# Altium footprint library Connector-USB.PcbLib: 42 footprints (part 2 of 3)
Each footprint in its own frame and in the unit in brackets; x right, y up, seen from the top. Pads: shape width x height; smd on the part's side, far side on the other; paste and mask are expansions set on the pad; w line width, h text height; cw(c..) or ccw(c..) is an arc to the next point about the centre after c.
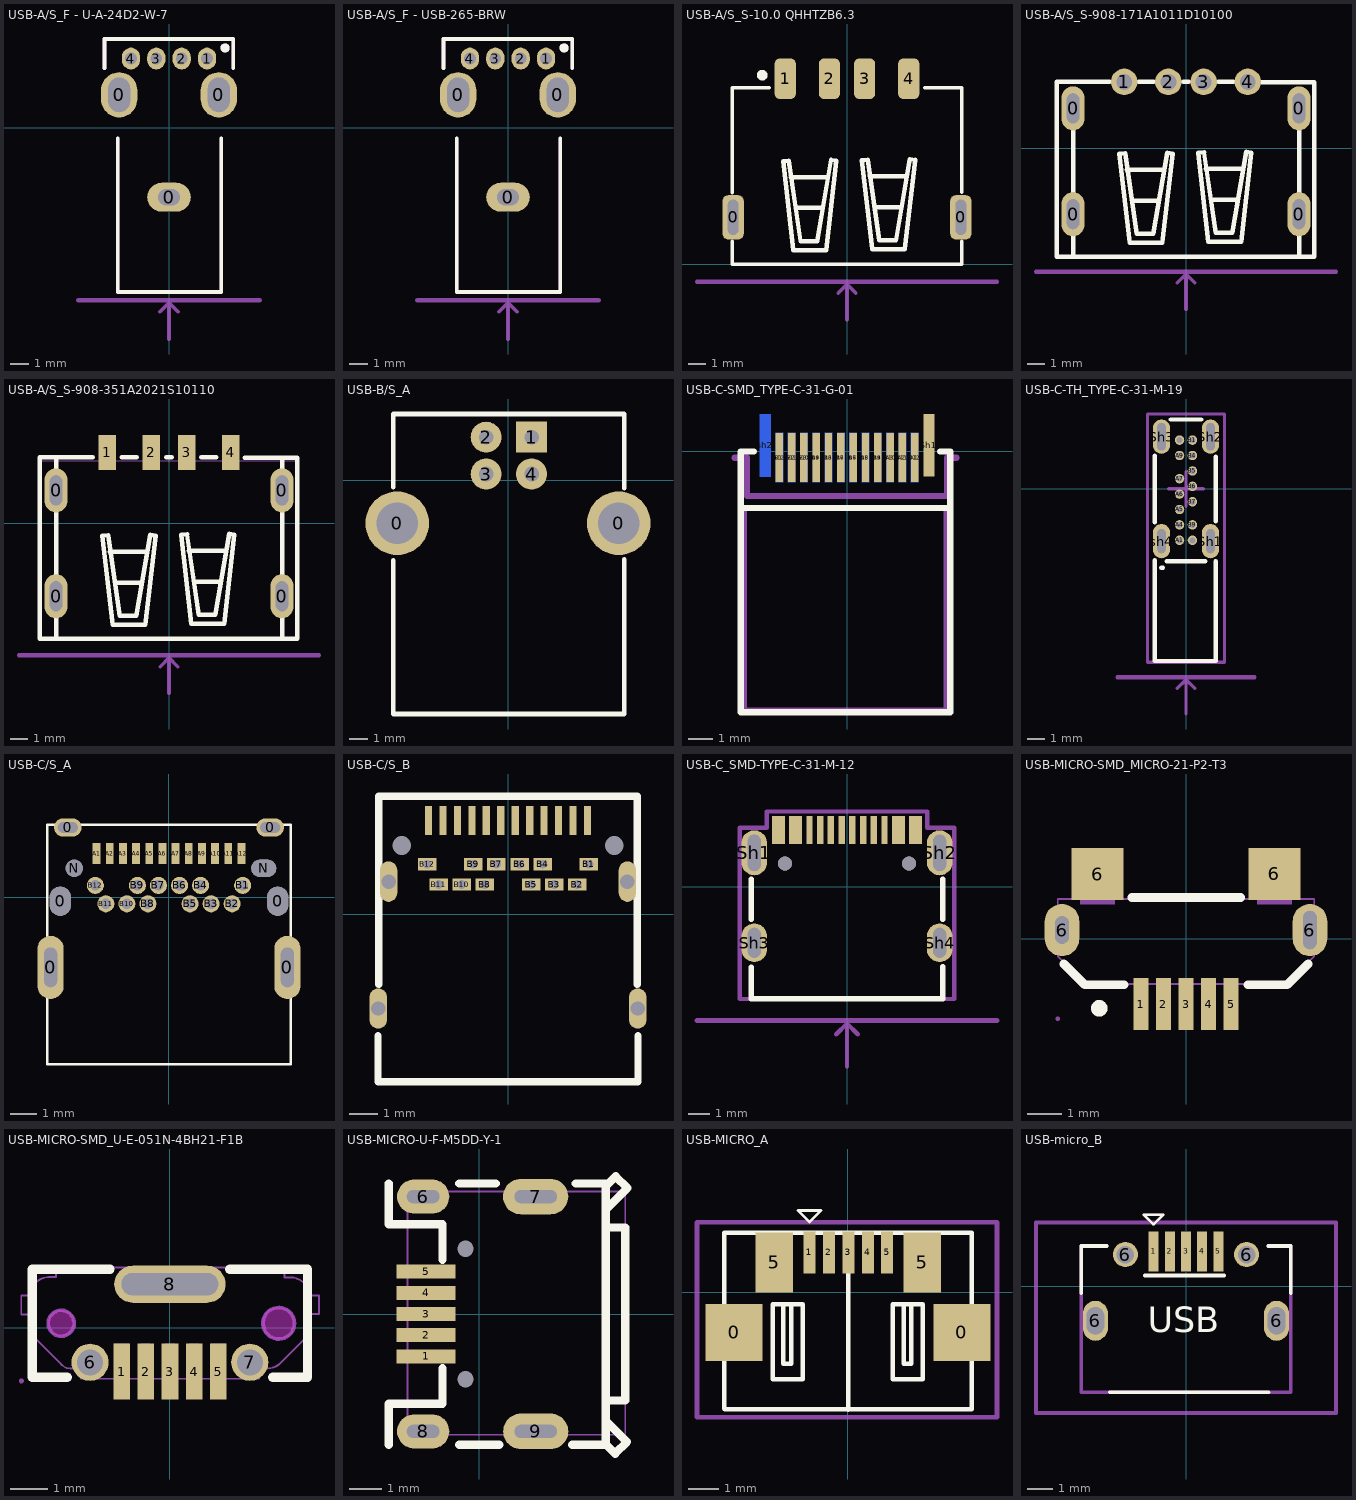
[diagram p1: the footprints below, top view; thin cyan lines are the x and y axes]

## USB-A/S_F - U-A-24D2-W-7 [mm] "U-A-24D2-W-7 & HRO 无卷边  白胶 USB-265-BRW()"
pads (7):
  oval 2x2.5 hole 1.2 slot 1.9 at 90 deg: 0(-2.75,1.825) 0(2.75,1.825)
  oval 2.4x1.6 hole 0.9 slot 1.2 at 0 deg: 0(0,-3.825)
  oval 1x1.2 hole 0.65: 1(2.1,3.825) 2(0.7,3.825) 3(-0.7,3.825) 4(-2.1,3.825)
Top Overlay:
  circle w0.25: c3.091,4.411 r0.125
  lines w0.2: -3.559,3.3 -3.559,4.903 3.552,4.903 3.552,3.3 ; -2.83,-0.579 -2.83,-9.049 2.89,-9.049 2.89,-0.579
Top Value:
  text "'.Comment'" at -0.436,3.24 h1.5
Top Designator:
  text "'.Designator'" at -0.314,4.296 h1.5
Body Extra:
  lines w0.2: -0.5,-10.144 0,-9.644 ; 0,-11.644 0,-9.644 ; 0.5,-10.144 0,-9.644
  lines w0.254: -5,-9.5 5,-9.5
Top Assembly (Mech20):
  circle w0.25: c3.091,4.411 r0.125
  lines w0.2: -3.559,3.3 -3.559,4.903 3.552,4.903 3.552,3.3 ; -2.83,-0.579 -2.83,-9.049 2.89,-9.049 2.89,-0.579
3D body "U-A-24D2-W-7(AF 14.0 CC-T).step": height 13.65, standoff -3.39, extent -3.559,-9.05 3.559,4.951

## USB-A/S_F - USB-265-BRW [mm] "USB-265-BRW 侧插 不带卷边 白色"
pads (7):
  oval 2x2.5 hole 1.2 slot 1.9 at 90 deg: 0(-2.75,1.825) 0(2.75,1.825)
  oval 2.4x1.6 hole 0.9 slot 1.2 at 0 deg: 0(0,-3.825)
  oval 1x1.2 hole 0.65: 1(2.1,3.825) 2(0.7,3.825) 3(-0.7,3.825) 4(-2.1,3.825)
Top Overlay:
  circle w0.25: c3.091,4.411 r0.125
  lines w0.2: -3.559,3.3 -3.559,4.903 3.552,4.903 3.552,3.3 ; -2.83,-0.579 -2.83,-9.049 2.89,-9.049 2.89,-0.579
Top Value:
  text "'.Comment'" at -0.436,3.24 h1.5
Top Designator:
  text "'.Designator'" at -0.314,4.296 h1.5
Body Extra:
  lines w0.2: -0.5,-10.144 0,-9.644 ; 0,-11.644 0,-9.644 ; 0.5,-10.144 0,-9.644
  lines w0.254: -5,-9.5 5,-9.5
Top Assembly (Mech20):
  circle w0.25: c3.091,4.411 r0.125
  lines w0.2: -3.559,3.3 -3.559,4.903 3.552,4.903 3.552,3.3 ; -2.83,-0.579 -2.83,-9.049 2.89,-9.049 2.89,-0.579
3D body "U-A-24D2-W-7(AF 14.0 CC-T).step": height 13.65, standoff -3.39, extent -3.559,-9.05 3.559,4.951

## USB-A/S_S-10.0 QHHTZB6.3 [mm] "SHOU HAN(首韩)  10.0 QHHTZB6.3"
pads (6):
  rrect50% 1.2x2.5 hole 0.6 slot 2 at 90 deg unplated: 0(-6.45,2.65) 0(6.45,2.65)
  rrect50% 1.2x2.3 smd: 1(-3.5,10.5) 2(-1,10.5) 3(1,10.5) 4(3.5,10.5)
Top Overlay:
  circle w0.3: c-4.8,10.7 r0.15
  lines w0.2: -6.5,1.302 -6.5,0 6.5,0 6.5,1.292 ; -6.5,4.03 -6.5,10 -4.4,10 ; 4.4,10 6.5,10 6.5,4.069
  lines w0.254: -3.193,4.932 -1.11,4.932 ; -2.863,3.179 -1.415,3.179 ; 1.278,4.982 3.36,4.982 ; 1.608,3.23 3.056,3.23 ; -3.622,5.838 -3.04,0.791 -1.186,0.791 -0.602,5.846 -0.907,5.897 -1.694,1.299 -2.634,1.299 -3.289,5.864 -3.622,5.838 ; 0.848,5.889 1.181,5.915 1.836,1.35 2.776,1.35 3.564,5.948 3.868,5.897 3.284,0.842 1.43,0.842 0.848,5.889
Top Component Outline:
  lines w0.2: -0.5,-1.644 0,-1.144 ; 0,-3.144 0,-1.144 ; 0.5,-1.644 0,-1.144
  lines w0.254: -8.5,-1 8.5,-1
Top Value:
  text "'.Comment'" at -3.08,6.124 h1.5
Top Designator:
  text "'.Designator'" at -4.136,6.245 h1.5
3D body "10.0 QHHTZB6.3.step": height 6.65, standoff -1.95, extent -7.25,0 7.25,11.4

## USB-A/S_S-908-171A1011D10100 [mm] "精拓金  908-171A1011D10100"
pads (8):
  oval 1.3x2.5 hole 0.7 slot 1.7 at 90 deg: 0(-6.4,-3.75) 0(-6.4,2.25) 0(6.4,-3.75) 0(6.4,2.25)
  round 1.5 hole 0.9: 1(-3.5,3.75) 2(-1,3.75) 3(1,3.75) 4(3.5,3.75)
Top Overlay:
  lines w0.2: -7.32,3.73 cw(c-7.3,3.73) -7.3,3.75
  lines w0.254: -7.32,-6.09 -7.32,-6.16 ; -7.32,3.73 -7.32,-6.16 ; -7.32,3.75 -4.331,3.75 ; -6.38,-4.981 -6.38,-6.16 -6.74,-6.16 ; -6.38,-2.519 -6.38,1.019 ; -3.353,-1.228 -1.27,-1.228 ; -3.023,-2.981 -1.575,-2.981 ; -2.669,3.75 -1.831,3.75 ; -0.169,3.75 0.169,3.75 ; 1.118,-1.177 3.2,-1.177 ; 1.448,-2.93 2.896,-2.93 ; 1.831,3.75 2.669,3.75 ; 4.29,3.73 7.26,3.73 7.26,-6.16 6.42,-6.16 ; 6.42,-4.981 6.42,-6.16 ; 6.42,-2.519 6.42,1.019 ; -7.32,-6.16 -6.74,-6.16 ; -6.74,-6.16 6.42,-6.16 ; -3.782,-0.322 -3.2,-5.368 -1.346,-5.368 -0.762,-0.314 -1.067,-0.263 -1.854,-4.86 -2.794,-4.86 -3.449,-0.296 -3.782,-0.322 ; 0.688,-0.271 1.021,-0.245 1.676,-4.81 2.616,-4.81 3.404,-0.212 3.708,-0.263 3.124,-5.318 1.27,-5.318 0.688,-0.271
Top Paste:
  drawing of 4 lines, arcs and shapes, not listed
Top Component Outline:
  lines w0.2: -0.5,-7.644 0,-7.144 ; 0,-9.144 0,-7.144 ; 0.5,-7.644 0,-7.144
  lines w0.254: -8.5,-7 8.5,-7
Top Value:
  text "'.Comment'" at -3.24,-0.036 h1.5
Top Designator:
  text "'.Designator'" at -4.296,0.085 h1.5
Top Assembly (Mech20):
  circle w0.6: c-3.5,3.75 r0.3
  circle w0.6: c1,3.75 r0.3
  circle w0.6: c3.5,3.75 r0.3
  circle w0.6: c-1,3.75 r0.3
  region: -6.55,-3.1 -6.25,-3.1 -6.25,-4.4 -6.55,-4.4
  region: -6.55,2.9 -6.25,2.9 -6.25,1.6 -6.55,1.6
  region: 6.25,2.9 6.55,2.9 6.55,1.6 6.25,1.6
  region: 6.25,-3.1 6.55,-3.1 6.55,-4.4 6.25,-4.4
  lines w0.051: -7.3,-6.08 7.3,-6.08 7.3,3.75 -7.3,3.75 -7.3,-6.08
3D body "USB-AS_S-908-171A1011D10100.step": height 6.9, standoff -2.8, extent -7.15,-6.08 7.15,3.92

## USB-A/S_S-908-351A2021S10110 [mm] "精拓金  908-351A2021S10110"
pads (8):
  oval 1.3x2.5 hole 0.7 slot 1.7 at 90 deg: 0(-6.4,-4.15) 0(-6.4,1.85) 0(6.4,-4.15) 0(6.4,1.85)
  rect 1x2 smd: 1(-3.5,4) 2(-1,4) 3(1,4) 4(3.5,4)
Top Overlay:
  lines w0.254: -6.38,-5.381 -6.38,-6.56 -6.74,-6.56 ; -6.38,-2.919 -6.38,0.619 ; -6.38,3.081 -6.38,3.72 ; -4.331,3.72 -7.32,3.72 -7.32,-6.49 -7.32,-6.56 -6.74,-6.56 ; -3.353,-1.628 -1.27,-1.628 ; -3.023,-3.381 -1.575,-3.381 ; -2.669,3.72 -1.831,3.72 ; -0.169,3.72 0.169,3.72 ; 1.118,-1.577 3.2,-1.577 ; 1.448,-3.33 2.896,-3.33 ; 1.831,3.72 2.669,3.72 ; 4.29,3.7 6.42,3.7 6.42,3.081 ; 6.292,3.7 7.26,3.7 7.26,-6.56 6.42,-6.56 ; 6.42,-5.381 6.42,-6.56 ; 6.42,-2.919 6.42,0.619 ; -6.74,-6.56 6.42,-6.56 ; -3.782,-0.721 -3.449,-0.696 -2.794,-5.26 -1.854,-5.26 -1.067,-0.663 -0.762,-0.714 -1.346,-5.768 -3.2,-5.768 -3.782,-0.721 ; 0.688,-0.671 1.27,-5.718 3.124,-5.718 3.708,-0.663 3.404,-0.612 2.616,-5.21 1.676,-5.21 1.021,-0.645 0.688,-0.671
Top Paste:
  drawing of 4 lines, arcs and shapes, not listed
Top Component Outline:
  lines w0.2: -0.5,-8.144 0,-7.644 ; 0,-9.644 0,-7.644 ; 0.5,-8.144 0,-7.644
  lines w0.254: -8.5,-7.5 8.5,-7.5
Top Value:
  text "'.Comment'" at -3.24,-0.436 h1.5
Top Designator:
  text "'.Designator'" at -4.296,-0.315 h1.5
Top Assembly (Mech20):
  region: -3.8,4.82 -3.2,4.82 -3.2,3.32 -3.8,3.32
  region: -1.3,4.82 -0.7,4.82 -0.7,3.32 -1.3,3.32
  region: 0.7,4.82 1.3,4.82 1.3,3.32 0.7,3.32
  region: 3.2,4.82 3.8,4.82 3.8,3.32 3.2,3.32
  region: 6.25,-3.5 6.55,-3.5 6.55,-4.8 6.25,-4.8
  region: 6.25,2.5 6.55,2.5 6.55,1.2 6.25,1.2
  region: -6.55,2.5 -6.25,2.5 -6.25,1.2 -6.55,1.2
  region: -6.55,-3.5 -6.25,-3.5 -6.25,-4.8 -6.55,-4.8
  lines w0.051: -7.3,-6.48 -7.3,3.52 7.3,3.52 7.3,-6.48 -7.3,-6.48
3D body "USB-AS_S-908-351A2021S10110_f.step": height 6.94, standoff -2.4, extent -7.2,-6.48 7.2,4.42

## USB-B/S_A [mm]
height 1.1
pads (6):
  round 3.5 hole 2.3: 0(-6.096,-2.371) 0(6.096,-2.371)
  rect 1.7x1.7 hole 0.8: 1(1.295,2.371)
  round 1.7 hole 0.8: 2(-1.205,2.371) 3(-1.205,0.339) 4(1.295,0.339)
Top Overlay:
  lines w0.254: -6.305,-4.398 -6.305,-12.869 6.395,-12.869 6.395,-4.347 ; -6.305,-0.385 -6.305,3.641 6.395,3.641 6.395,-0.436
Top Value:
  text "'.Comment'" at -4.314,-0.581 h2
Top Designator:
  text "'.Designator'" at -5.721,-0.419 h2
3D body "USB-B_S-A.STEP": height 11.45, standoff -2.95, extent -6.708,-12.891 7.01,3.409

## USB-C-SMD_TYPE-C-31-G-01 [mm]
pads (26):
  rect 0.3x2 smd: A1(2.75,-0.25) A2(2.25,-0.25) A3(1.75,-0.25) A4(1.25,-0.25) A5(0.75,-0.25) A6(0.25,-0.25) A7(-0.25,-0.25) A8(-0.75,-0.25) A9(-1.25,-0.25) A10(-1.75,-0.25) A11(-2.25,-0.25) A12(-2.75,-0.25)
  rect 0.3x2 smd far side: B1(-2.75,-0.25) B2(-2.25,-0.25) B3(-1.75,-0.25) B4(-1.25,-0.25) B5(-0.75,-0.25) B6(-0.25,-0.25) B7(0.25,-0.25) B8(0.75,-0.25) B9(1.25,-0.25) B10(1.75,-0.25) B11(2.25,-0.25) B12(2.75,-0.25)
  rect 0.45x2.54 smd: Sh1(3.325,0.25)
  rect 0.45x2.54 smd far side: sh2(-3.325,0.25)
Top Overlay:
  lines w0.254: -4.318,-2.3 0.02,-2.3 4.191,-2.3 ; -3.781,0 -4.318,0 -4.318,-10.6 4.191,-10.6 4.191,0 3.781,0
Top Component Outline:
  region: -4.318,-2.413 -4.318,-10.668 4.191,-10.668 4.191,-2.413 3.937,-2.413 3.937,-10.414 -4.064,-10.414 -4.064,-2.413
  lines w0.254: -4.572,-0.255 -4.065,-0.255 -4.065,-0.666 ; -4.065,-0.666 -4.065,-1.809 4.063,-1.809 4.063,-0.666 4.063,-0.255 4.445,-0.255
3D body "664121_1657865677_cdfdff936b258642.stp": height 1, standoff -2, extent -4.25,-10.553 4.15,1.053

## USB-C-TH_TYPE-C-31-M-19 [mm]
pads (18):
  round 0.55 hole 0.35: A1(-0.375,-3) A4(-0.375,-2.1) A5(-0.375,-1.2) A6(-0.375,-0.3) A7(-0.375,0.6) A9(-0.375,1.95) A12(-0.375,2.85) B1(0.375,2.85) B4(0.375,1.95) B5(0.375,1.05) B6(0.375,0.15) B7(0.375,-0.75) B9(0.375,-2.1) B12(0.375,-3)
  oval 1x2 hole 0.5 slot 1.4 at 90 deg: Sh1(1.43,-3.05) sh4(-1.43,-3.05)
  oval 1x2 hole 0.5 slot 1.6 at 90 deg: Sh2(1.43,3.05) Sh3(-1.43,3.05)
Top Overlay:
  lines w0.254: -1.83,-4.162 -1.83,-10.05 1.73,-10.05 1.73,-4.216 1.727,-4.216 ; -1.83,-1.938 -1.83,1.939 ; -1.449,-4.597 -1.346,-4.597 ; -1.133,-4.216 1.133,-4.216 ; -0.898,4.05 0.897,4.05 ; 1.73,-1.883 1.73,1.884
Top Component Outline:
  lines w0.2: -2.25,-10.125 -2.25,4.375 2.25,4.375 2.25,-10.125 -2.25,-10.125
Top Component Center:
  lines w0.2: -1,0 1,0 ; 0,-1 0,1
Top Value:
  text "'.Comment'" at -0.581,4.314 h2
Top Designator:
  text "'.Designator'" at -0.419,5.721 h2
Body Extra:
  lines w0.2: -0.5,-11.644 0,-11.144 ; 0,-13.144 0,-11.144 ; 0.5,-11.644 0,-11.144
  lines w0.254: -4,-11 4,-11
3D body "type-c-31-m-19_s201b25d.stp": height 9.35, standoff -1.52, extent -1.85,-10.05 1.85,3.95

## USB-C/S_A [mm]
pads (32):
  oval 1x2.4 hole 0.5 slot 1.5 at 90 deg: 0(-4.5,-2.657) 0(4.5,-2.657)
  oval 0.8x1.1 hole 0.8 slot 1.1 at 90 deg: 0(-4.13,-0.142) 0(4.13,-0.142)
  oval 1.05x0.7 hole 0.4 slot 0.75 at 0 deg: 0(-3.845,2.658) 0(3.845,2.658)
  rect 0.3x0.8 smd: A1(-2.75,1.667) A2(-2.25,1.667) A3(-1.75,1.667) A4(-1.25,1.667) A5(-0.75,1.667) A6(-0.25,1.667) A7(0.25,1.667) A8(0.75,1.667) A9(1.25,1.667) A10(1.75,1.667) A11(2.25,1.667) A12(2.75,1.667)
  round 0.65 hole 0.4: B1(2.8,0.457) B2(2.4,-0.242) B3(1.6,-0.242) B4(1.2,0.457) B5(0.8,-0.242) B6(0.4,0.457) B7(-0.4,0.457) B8(-0.8,-0.242) B9(-1.2,0.457) B10(-1.6,-0.242) B11(-2.4,-0.242) B12(-2.8,0.457)
  round 0.65 hole 0.65: N(-3.6,1.108)
  oval 0.95x0.65 hole 0.65 slot 0.95 at 0 deg: N(3.6,1.108)
Top Overlay:
  lines w0.1: -4.625,-6.342 -4.625,2.758 4.625,2.758 4.625,-6.342 -4.625,-6.342
Top Value:
  text "'.Comment'" at -4.314,-0.581 h2
Top Designator:
  text "'.Designator'" at -5.721,-0.419 h2

## USB-C/S_B [mm]
pads (30):
  rect 0.25x1 smd: A1(-2.75,3.253) A2(-2.25,3.253) A3(-1.75,3.253) A4(-1.25,3.253) A5(-0.75,3.253) A6(-0.25,3.253) A7(0.25,3.253) A8(0.75,3.253) A9(1.25,3.253) A10(1.75,3.253) A11(2.25,3.253) A12(2.75,3.253)
  rect 0.64x0.42 hole 0.3: B1(2.8,1.737) B2(2.4,1.037) B3(1.6,1.037) B4(1.2,1.737) B5(0.8,1.037) B6(0.4,1.737) B7(-0.4,1.737) B8(-0.8,1.037) B9(-1.2,1.737) B10(-1.6,1.037) B11(-2.4,1.037) B12(-2.8,1.737)
  oval 0.6x1.4 hole 0.5: ""(-4.49,-3.253) ""(-4.13,1.137) ""(4.13,1.137) ""(4.49,-3.253)
  round 0 hole 0.65: ""(-3.675,2.387) ""(3.675,2.387)
Top Overlay:
  lines w0.254: -4.5,-4.2 -4.5,-5.783 4.5,-5.783 4.5,-4.2 ; -4.475,-2.413 -4.475,4.087 4.475,4.087 4.475,-2.413
Top Value:
  text "'.Comment'" at -4.314,-0.581 h2
Top Designator:
  text "'.Designator'" at -5.721,-0.419 h2

## USB-C_SMD-TYPE-C-31-M-12 [mm]
pads (22):
  rect 0.3x1.3 smd: A1(-3.35,2.643) A4(-2.55,2.643) A5(-1.25,2.643) A6(-0.25,2.643) A7(0.25,2.643) A8(1.25,2.643) A9(2.55,2.643) A12(3.35,2.643) B1(3.05,2.643) B4(2.25,2.643) B5(1.75,2.643) B6(0.75,2.643) B7(-0.75,2.643) B8(-1.75,2.643) B9(-2.25,2.643) B12(-3.05,2.643)
  oval 1.2x2.1 hole 0.6 slot 1.7 at 90 deg: Sh1(-4.325,1.575) Sh2(4.325,1.575)
  oval 1.2x1.8 hole 0.6 slot 1.4 at 90 deg: Sh3(-4.325,-2.625) Sh4(4.325,-2.625)
  round 0.65 hole 0.65 unplated: ""(-2.9,1.075) ""(2.9,1.075)
Top Overlay:
  lines w0.254: -4.469,-3.753 -4.469,-5.234 4.471,-5.234 4.471,-3.752 ; -4.469,-1.516 -4.469,0.347 ; 4.471,-1.516 4.471,0.348
Top Value:
  text "'.Comment'" at -4.314,-0.581 h2
Top Designator:
  text "'.Designator'" at -5.721,-0.419 h2
Body Extra:
  lines w0.2: -0.5,-6.894 0,-6.394 ; 0,-8.394 0,-6.394 ; 0.5,-6.894 0,-6.394
  lines w0.254: -7,-6.25 7,-6.25
Top Assembly (Mech20):
  lines w0.2: -5,-5.25 -5,2.75 -3.75,2.75 -3.75,3.5 3.75,3.5 3.75,2.75 5,2.75 5,-5.25 -5,-5.25
3D body "TYPE-C-31-M-12.stp": height 3.21, standoff -1.05, extent -4.47,-5.23 4.47,2.52

## USB-MICRO-SMD_MICRO-21-P2-T3 [mm]
pads (9):
  rect 0.429x1.509 smd mask+0.05: 1(-1.3,-1.877) 2(-0.65,-1.877) 3(0,-1.877) 4(0.65,-1.877) 5(1.3,-1.877)
  oval 1.001x1.501 hole 0.4 slot 0.8 at 90 deg mask+0.05: 6(-3.575,0.257)
  rect 1.501x1.501 smd mask+0.05: 6(-2.55,1.872) 6(2.55,1.877)
  oval 1.001x1.501 hole 0.4 slot 1.1 at 90 deg mask+0.05: 6(3.575,0.257)
Top Overlay:
  circle w0.239: c-2.5,-2 r0.119
  lines w0.254: -3.523,-0.719 -2.921,-1.321 -1.781,-1.321 ; -1.56,1.196 1.577,1.196 ; 1.781,-1.321 2.921,-1.321 3.523,-0.719
Top Paste:
  region: 1.801,2.626 3.299,2.626 3.299,1.128 1.801,1.128
  region: -3.299,2.621 -1.801,2.621 -1.801,1.123 -3.299,1.123
  region: 1.049,-1.123 1.549,-1.123 1.549,-2.631 1.049,-2.631
  region: 0.401,-1.123 0.899,-1.123 0.899,-2.631 0.401,-2.631
  region: -0.249,-1.123 0.249,-1.123 0.249,-2.631 -0.249,-2.631
  region: -0.899,-1.123 -0.399,-1.123 -0.399,-2.631 -0.899,-2.631
  region: -1.549,-1.123 -1.049,-1.123 -1.049,-2.631 -1.549,-2.631
  region: 3.099,0.508 3.1,0.607 3.176,0.79 3.317,0.929 3.5,1.005 3.698,1.005 3.881,0.929 4.022,0.79 4.099,0.607 4.1,0.508 4.1,0.008 4.099,-0.091 4.022,-0.274 3.881,-0.414 3.698,-0.489 3.5,-0.489 3.317,-0.414 3.176,-0.274 3.1,-0.091 3.099,0.008
  region: -4.1,0.508 -4.099,0.607 -4.022,0.79 -3.881,0.929 -3.698,1.005 -3.5,1.005 -3.317,0.929 -3.176,0.79 -3.1,0.607 -3.099,0.508 -3.099,0.008 -3.1,-0.091 -3.176,-0.274 -3.317,-0.414 -3.5,-0.489 -3.698,-0.489 -3.881,-0.414 -4.022,-0.274 -4.099,-0.091 -4.1,0.008
Top Component Outline:
  region: -3.051,1.001 -3.051,2.2 -2.05,2.2 -2.05,1.001
  region: 2.05,1.001 2.05,2.2 3.051,2.2 3.051,1.001
  region: -1.425,-1.25 -1.176,-1.25 -1.176,-2.299 -1.425,-2.299
  region: -0.775,-1.25 -0.526,-1.25 -0.526,-2.299 -0.775,-2.299
  region: -0.124,-1.25 0.124,-1.25 0.124,-2.299 -0.124,-2.299
  region: 0.526,-1.25 0.775,-1.25 0.775,-2.299 0.526,-2.299
  region: 1.176,-1.25 1.425,-1.25 1.425,-2.299 1.176,-2.299
  region: -3.701,0.632 -3.449,0.632 -3.449,-0.117 -3.701,-0.117
  region: 3.449,0.632 3.701,0.632 3.701,-0.117 3.449,-0.117
  region: -3.64,-2.299 -3.64,-2.273 -3.676,-2.238 -3.726,-2.238 -3.762,-2.273 -3.762,-2.299 -3.762,-2.324 -3.726,-2.36 -3.676,-2.36 -3.64,-2.324 -3.64,-2.299
  lines w0.051: -3.701,-0.5 -2.85,-1.3 2.85,-1.3 3.701,-0.5 3.701,1.151 -3.701,1.151 -3.701,-0.5
Top Value:
  text "'.Comment'" at -4.314,-0.581 h2
Top Designator:
  text "'.Designator'" at -5.721,-0.419 h2
Top Assembly:
  region: -3.051,1.001 -3.051,2.2 -2.05,2.2 -2.05,1.001
  region: 2.05,1.001 2.05,2.2 3.051,2.2 3.051,1.001
  region: -1.425,-1.25 -1.176,-1.25 -1.176,-2.299 -1.425,-2.299
  region: -0.775,-1.25 -0.526,-1.25 -0.526,-2.299 -0.775,-2.299
  region: -0.124,-1.25 0.124,-1.25 0.124,-2.299 -0.124,-2.299
  region: 0.526,-1.25 0.775,-1.25 0.775,-2.299 0.526,-2.299
  region: 1.176,-1.25 1.425,-1.25 1.425,-2.299 1.176,-2.299
  region: -3.701,0.632 -3.449,0.632 -3.449,-0.117 -3.701,-0.117
  region: 3.449,0.632 3.701,0.632 3.701,-0.117 3.449,-0.117
  region: -3.64,-2.299 -3.64,-2.273 -3.676,-2.238 -3.726,-2.238 -3.762,-2.273 -3.762,-2.299 -3.762,-2.324 -3.726,-2.36 -3.676,-2.36 -3.64,-2.324 -3.64,-2.299
  lines w0.051: -3.701,-0.5 -2.85,-1.3 2.85,-1.3 3.701,-0.5 3.701,1.151 -3.701,1.151 -3.701,-0.5
Top Assembly (Mech20):
  region: -3.051,1.001 -3.051,2.2 -2.05,2.2 -2.05,1.001
  region: 2.05,1.001 2.05,2.2 3.051,2.2 3.051,1.001
  region: -1.425,-1.25 -1.176,-1.25 -1.176,-2.299 -1.425,-2.299
  region: -0.775,-1.25 -0.526,-1.25 -0.526,-2.299 -0.775,-2.299
  region: -0.124,-1.25 0.124,-1.25 0.124,-2.299 -0.124,-2.299
  region: 0.526,-1.25 0.775,-1.25 0.775,-2.299 0.526,-2.299
  region: 1.176,-1.25 1.425,-1.25 1.425,-2.299 1.176,-2.299
  region: -3.701,0.632 -3.449,0.632 -3.449,-0.117 -3.701,-0.117
  region: 3.449,0.632 3.701,0.632 3.701,-0.117 3.449,-0.117
  region: -3.64,-2.299 -3.64,-2.273 -3.676,-2.238 -3.726,-2.238 -3.762,-2.273 -3.762,-2.299 -3.762,-2.324 -3.726,-2.36 -3.676,-2.36 -3.64,-2.324 -3.64,-2.299
  lines w0.051: -3.701,-0.5 -2.85,-1.3 2.85,-1.3 3.701,-0.5 3.701,1.151 -3.701,1.151 -3.701,-0.5

## USB-MICRO-SMD_U-E-051N-4BH21-F1B [mm] "MicroUSB 母座立贴"
pads (8):
  rect 0.45x1.501 smd mask+0.051: 1(-1.3,-1.176) 2(-0.65,-1.176) 3(0,-1.176) 4(0.65,-1.176) 5(1.3,-1.176)
  round 1.001 hole 0.701 mask+0.051: 6(-2.149,-0.925) 7(2.149,-0.925)
  oval 3x1.001 hole 0.599 slot 2.601 at 0 deg mask+0.051: 8(0,1.176)
Top Overlay:
  lines w0.254: -2.761,-1.326 -3.701,-1.326 -3.701,1.575 -1.613,1.575 ; 1.61,1.575 3.701,1.575 3.701,-1.326 2.761,-1.326
Top Paste:
  circle w0.5: c-2.149,-0.925 r0.249
  circle w0.5: c2.149,-0.925 r0.249
  region: -1.031,1.679 -1.123,1.679 -1.292,1.609 -1.421,1.48 -1.491,1.311 -1.491,1.219 -1.491,1.191 -1.491,1.14 -1.491,1.047 -1.419,0.874 -1.287,0.742 -1.115,0.671 -1.021,0.671 1.021,0.671 1.023,0.671 1.027,0.672 1.03,0.675 1.031,0.679 1.031,0.681 1.125,0.681 1.297,0.752 1.43,0.884 1.501,1.057 1.501,1.151 1.501,1.199 1.501,1.229 1.501,1.319 1.432,1.485 1.305,1.611 1.139,1.679 1.049,1.679
  region: -1.074,-1.923 -1.524,-1.923 -1.524,-0.424 -1.074,-0.424
  region: -0.424,-1.923 -0.874,-1.923 -0.874,-0.424 -0.424,-0.424
  region: 0.226,-1.923 -0.226,-1.923 -0.226,-0.424 0.226,-0.424
  region: 0.874,-1.923 0.424,-1.923 0.424,-0.424 0.874,-0.424
  region: 1.524,-1.923 1.074,-1.923 1.074,-0.424 1.524,-0.424
Keep-Out Layer:
  board cut-out: 3.35,0.124 3.35,0.209 3.286,0.365 3.166,0.484 3.01,0.549 2.842,0.549 2.686,0.484 2.566,0.365 2.502,0.209 2.502,0.124 2.502,0.04 2.566,-0.116 2.686,-0.235 2.842,-0.3 3.01,-0.3 3.166,-0.235 3.286,-0.116 3.35,0.04 3.35,0.124
  board cut-out: -2.576,0.124 -2.576,0.194 -2.629,0.323 -2.728,0.422 -2.856,0.475 -2.996,0.475 -3.125,0.422 -3.223,0.323 -3.277,0.194 -3.277,0.124 -3.277,0.055 -3.223,-0.074 -3.125,-0.173 -2.996,-0.226 -2.856,-0.226 -2.728,-0.173 -2.629,-0.074 -2.576,0.055 -2.576,0.124
  board cut-out: 2.502,0.124 2.502,0.04 2.566,-0.116 2.686,-0.235 2.842,-0.3 2.926,-0.3 3.01,-0.3 3.166,-0.235 3.286,-0.116 3.35,0.04 3.35,0.124 3.35,0.209 3.286,0.365 3.166,0.484 3.01,0.549 2.926,0.549 2.842,0.549 2.686,0.484 2.566,0.365 2.502,0.209
  board cut-out: -2.926,-0.226 -2.996,-0.226 -3.125,-0.173 -3.223,-0.074 -3.277,0.055 -3.277,0.124 -3.277,0.194 -3.223,0.323 -3.125,0.422 -2.996,0.475 -2.926,0.475 -2.856,0.475 -2.728,0.422 -2.629,0.323 -2.576,0.194 -2.576,0.124 -2.576,0.055 -2.629,-0.074 -2.728,-0.173 -2.856,-0.226
Board Outline:
  circle w0.1: c2.926,0.124 r0.424
  circle w0.1: c-2.926,0.124 r0.351
Top Component Outline:
  region: -1.1,-0.424 -1.1,-1.425 -1.501,-1.425 -1.501,-0.424
  region: 1.501,-0.424 1.501,-1.425 1.1,-1.425 1.1,-0.424
  region: -0.526,-0.424 -0.526,-1.425 -0.775,-1.425 -0.775,-0.424
  region: 0.124,-0.424 0.124,-1.425 -0.124,-1.425 -0.124,-0.424
  region: 0.775,-0.424 0.775,-1.425 0.526,-1.425 0.526,-0.424
  region: 1.001,0.935 -1.001,0.935 -1.001,1.415 1.001,1.415
  region: 2.398,-0.925 2.398,-0.875 2.36,-0.784 2.29,-0.714 2.198,-0.676 2.099,-0.676 2.008,-0.714 1.938,-0.784 1.9,-0.875 1.9,-0.925 1.9,-0.974 1.938,-1.066 2.008,-1.136 2.099,-1.173 2.198,-1.173 2.29,-1.136 2.36,-1.066 2.398,-0.974 2.398,-0.925
  region: -1.9,-0.925 -1.9,-0.875 -1.938,-0.784 -2.008,-0.714 -2.099,-0.676 -2.198,-0.676 -2.29,-0.714 -2.36,-0.784 -2.398,-0.875 -2.398,-0.925 -2.398,-0.974 -2.36,-1.066 -2.29,-1.136 -2.198,-1.173 -2.099,-1.173 -2.008,-1.136 -1.938,-1.066 -1.9,-0.974 -1.9,-0.925
  region: -3.94,-1.425 -3.94,-1.4 -3.975,-1.364 -4.026,-1.364 -4.061,-1.4 -4.061,-1.425 -4.061,-1.45 -4.026,-1.486 -3.975,-1.486 -3.94,-1.45 -3.94,-1.425
  lines w0.051: -4,0.361 -3.749,0.361 cw(c-3.775,0.336) -3.739,0.335 -3.739,0.01 -3.739,-0.028 ccw(c-3.398,-0.029) -3.64,-0.269 -2.916,-0.993 ccw(c-2.899,-0.979) -2.901,-1.001 ccw(c-2.684,-0.782) -2.682,-1.09 -2.601,-1.09 -2.413,-1.09 cw(c-2.414,-1.122) -2.39,-1.1 -2.39,-1.369 -1.519,-1.369 2.4,-1.369 2.4,-1.09 2.629,-1.09 ccw(c2.629,-0.605) 2.972,-0.947 3,-0.919 3.655,-0.264 ccw(c3.623,-0.229) 3.67,-0.231 ccw(c3.499,-0.063) 3.739,-0.061 3.739,0.17 3.739,0.345 cw(c3.775,0.346) 3.749,0.371 4.011,0.371 4.011,0.871 3.739,0.871 ccw(c3.251,0.871) 3.251,1.359 3.081,1.359 3.081,1.641 cw(c3.071,1.641) 3.071,1.631 -3.071,1.631 -3.071,1.369 -3.251,1.369 ccw(c-3.251,0.871) -3.749,0.871 -4,0.871 -4,0.361
Top Value:
  text "'.Comment'" at -4.314,-0.581 h2
Top Designator:
  text "'.Designator'" at -5.721,-0.419 h2
Top Assembly (Mech20):
  region: -1.1,-0.424 -1.1,-1.425 -1.501,-1.425 -1.501,-0.424
  region: 1.501,-0.424 1.501,-1.425 1.1,-1.425 1.1,-0.424
  region: -0.526,-0.424 -0.526,-1.425 -0.775,-1.425 -0.775,-0.424
  region: 0.124,-0.424 0.124,-1.425 -0.124,-1.425 -0.124,-0.424
  region: 0.775,-0.424 0.775,-1.425 0.526,-1.425 0.526,-0.424
  region: 1.001,0.935 -1.001,0.935 -1.001,1.415 1.001,1.415
  region: 2.398,-0.925 2.398,-0.875 2.36,-0.784 2.29,-0.714 2.198,-0.676 2.099,-0.676 2.008,-0.714 1.938,-0.784 1.9,-0.875 1.9,-0.925 1.9,-0.974 1.938,-1.066 2.008,-1.136 2.099,-1.173 2.198,-1.173 2.29,-1.136 2.36,-1.066 2.398,-0.974 2.398,-0.925
  region: -1.9,-0.925 -1.9,-0.875 -1.938,-0.784 -2.008,-0.714 -2.099,-0.676 -2.198,-0.676 -2.29,-0.714 -2.36,-0.784 -2.398,-0.875 -2.398,-0.925 -2.398,-0.974 -2.36,-1.066 -2.29,-1.136 -2.198,-1.173 -2.099,-1.173 -2.008,-1.136 -1.938,-1.066 -1.9,-0.974 -1.9,-0.925
  region: -3.94,-1.425 -3.94,-1.4 -3.975,-1.364 -4.026,-1.364 -4.061,-1.4 -4.061,-1.425 -4.061,-1.45 -4.026,-1.486 -3.975,-1.486 -3.94,-1.45 -3.94,-1.425
  lines w0.051: -4,0.361 -3.749,0.361 cw(c-3.775,0.336) -3.739,0.335 -3.739,0.01 -3.739,-0.028 ccw(c-3.398,-0.029) -3.64,-0.269 -2.916,-0.993 ccw(c-2.899,-0.979) -2.901,-1.001 ccw(c-2.684,-0.782) -2.682,-1.09 -2.601,-1.09 -2.413,-1.09 cw(c-2.414,-1.122) -2.39,-1.1 -2.39,-1.369 -1.519,-1.369 2.4,-1.369 2.4,-1.09 2.629,-1.09 ccw(c2.629,-0.605) 2.972,-0.947 3,-0.919 3.655,-0.264 ccw(c3.623,-0.229) 3.67,-0.231 ccw(c3.499,-0.063) 3.739,-0.061 3.739,0.17 3.739,0.345 cw(c3.775,0.346) 3.749,0.371 4.011,0.371 4.011,0.871 3.739,0.871 ccw(c3.251,0.871) 3.251,1.359 3.081,1.359 3.081,1.641 cw(c3.071,1.641) 3.071,1.631 -3.071,1.631 -3.071,1.369 -3.251,1.369 ccw(c-3.251,0.871) -3.749,0.871 -4,0.871 -4,0.361
3D body "U-E-051N-4BH21-S1B.stp": height 5.82, standoff -0.83, extent -3.902,-1.56 3.903,1.554

## USB-MICRO-U-F-M5DD-Y-1 [mm] "U-F-M5DD-Y-1 & HRO"
pads (11):
  round 0.1 hole 0.5 unplated: 0(-0.425,-2) 0(-0.425,2)
  rect 1.8x0.43 smd paste-100 mask+0.051: 1(-1.636,-1.3) 2(-1.636,-0.65) 3(-1.636,0) 4(-1.636,0.65) 5(-1.636,1.3)
  oval 1.6x1.05 hole 0.4 slot 1 at 0 deg paste-2539.97 mask+0.051: 6(-1.725,3.599) 8(-1.725,-3.599)
  oval 2x1.09 hole 0.4 slot 1.3 at 0 deg copper offset -0.001,0 paste-2539.97 mask+0.051: 7(1.725,3.599)
  oval 2x1.09 hole 0.4 slot 1.3 at 0 deg copper offset 0.001,0 paste-2539.97 mask+0.051: 9(1.725,-3.598)
Top Overlay:
  lines w0.254: -2.785,-4.01 -2.785,-2.76 ; -2.785,-2.75 -1.135,-2.75 -1.135,-1.66 ; -2.785,4 -2.785,2.75 -1.135,2.75 -1.135,1.66 ; -0.623,-4.01 0.603,-4.01 ; -0.617,4 0.497,4 ; 2.847,-4.01 3.875,-4.01 ; 2.953,4 3.875,4 3.875,-4 ; 3.85,-3.97 4.16,-4.28 4.52,-3.92 3.88,-3.28 ; 3.865,3.91 4.175,4.22 4.535,3.86 3.895,3.22 ; 3.88,-2.65 4.47,-2.65 4.47,2.65 3.88,2.65
Top Paste:
  drawing of 9 lines, arcs and shapes, not listed
Top Value:
  text "'.Comment'" at -0.591,4.314 h2
Top Designator:
  text "'.Designator'" at -0.429,5.721 h2
Top Assembly (Mech20):
  circle w0.2: c-0.425,-2 r0.1
  circle w0.2: c-0.425,2 r0.1
  region: -2.144,-3.699 -2.144,-3.674 -2.179,-3.639 -2.229,-3.639 -2.264,-3.674 -2.264,-3.699 -2.264,-3.724 -2.229,-3.759 -2.179,-3.759 -2.144,-3.724 -2.144,-3.699
  region: -1.908,-1.151 -1.008,-1.151 -1.008,-1.451 -1.908,-1.451
  region: -1.908,-0.5 -1.008,-0.5 -1.008,-0.8 -1.908,-0.8
  region: -1.908,0.15 -1.008,0.15 -1.008,-0.15 -1.908,-0.15
  region: -1.908,0.8 -1.008,0.8 -1.008,0.5 -1.908,0.5
  region: -1.908,1.45 -1.008,1.45 -1.008,1.15 -1.908,1.15
  region: -1.345,3.724 -1.345,3.474 -2.145,3.474 -2.145,3.724
  region: 2.18,3.724 2.18,3.474 1.27,3.474 1.27,3.724
  region: -1.345,-3.429 -1.345,-3.679 -2.145,-3.679 -2.145,-3.429
  region: 2.18,-3.429 2.18,-3.679 1.27,-3.679 1.27,-3.429
  lines w0.051: -2.204,-3.699 4.475,-3.699 4.475,3.755 -2.204,3.755 -2.204,-3.699
3D body "u-f-m5dd-y-1 v1.step": height 2.79, standoff -0.95, extent -2.23,-3.985 4.47,3.985

## USB-MICRO_A [mm]
pads (9):
  rect 1.9x1.9 smd: 0(-3.797,-1.333) 0(3.797,-1.333)
  rect 0.4x1.4 smd: 1(-1.283,1.333) 2(-0.635,1.333) 3(0.013,1.333) 4(0.66,1.333) 5(1.308,1.333)
  rect 1.25x2 smd: 5(-2.451,1.003) 5(2.476,1.003)
Top Overlay:
  lines w0.1: -1.664,2.73 -1.283,2.349 -0.902,2.73 -1.664,2.73
  lines w0.152: -4.127,-3.873 -4.127,1.994 ; -4.102,-3.899 4.102,-3.899 ; -4.077,1.994 4.102,1.994 ; -2.152,-0.394 -2.152,-2.379 -1.949,-2.379 -1.898,-2.379 -1.898,-0.394 ; 0.013,-3.91 0.013,1.968 ; 1.861,-0.394 1.861,-2.379 2.115,-2.379 2.115,-0.394 ; 4.127,-3.899 4.127,1.994 ; -2.513,-2.894 -2.513,-0.394 -1.513,-0.394 -1.513,-2.894 -2.513,-2.894 ; 1.487,-2.894 2.487,-2.894 2.487,-0.394 1.487,-0.394 1.487,-2.894
Top Value:
  text "'.Comment'" at -4.314,-0.581 h2
Top Designator:
  text "'.Designator'" at -5.721,-0.419 h2
Top Courtyard:
  lines w0.152: -5.033,-4.166 -5.033,2.334 4.967,2.334 4.967,-4.166 -5.033,-4.166
3D body "USB-MICRO_A.STEP": height 2.69, standoff -0.24, extent -3.994,-3.746 3.969,1.675

## USB-micro_B [mm]
pads (9):
  rect 0.4x1.6 smd paste-100 mask+0.051: 1(-1.3,1.387) 2(-0.65,1.387) 3(0,1.387) 4(0.65,1.387) 5(1.3,1.387)
  oval 1x1.6 hole 0.7 slot 1.1 at 90 deg paste-2539.97 mask+0.051: 6(-3.625,-1.387) 6(3.625,-1.387)
  round 1 hole 0.7 paste-2539.97 mask+0.051: 6(-2.425,1.263) 6(2.425,1.263)
Top Overlay:
  lines w0.1: -1.681,2.847 -0.919,2.847 -1.3,2.466 -1.681,2.847
  lines w0.152: -4.191,-0.282 -4.191,1.598 -3.175,1.598 ; -3.048,-4.244 3.302,-4.244 ; -1.65,0.425 1.525,0.425 ; 3.302,1.598 4.191,1.598 4.191,-0.282
  text "USB" at -1.524,-1.852 h1.02
Top Value:
  text "'.Comment'" at -4.314,-0.581 h2
Top Designator:
  text "'.Designator'" at -5.721,-0.419 h2
Top Courtyard:
  lines w0.152: -6,-5.08 -6,2.54 6,2.54 6,-5.08 -6,-5.08
Top Assembly (Mech20):
  lines w0.1: -1.681,2.847 -0.919,2.847 -1.3,2.466 -1.681,2.847
  lines w0.152: -3.175,1.598 -4.191,1.598 -4.191,-0.282 -4.191,-4.244 -3.048,-4.244 3.302,-4.244 4.191,-4.244 4.191,-0.282 4.191,1.598 3.302,1.598
3D body "USB-MICRO_B.STEP": height 2.8, standoff -0.95, extent -4.001,-4.15 4.001,1.45